# Altium footprint library WR-TBL_Pluggable Connector_5.08mm.PcbLib: 295 footprints (part 4 of 19)
Each footprint in its own frame and in the unit in brackets; x right, y up, seen from the top. Pads: shape width x height; smd on the part's side, far side on the other; paste and mask are expansions set on the pad; w line width, h text height; cw(c..) or ccw(c..) is an arc to the next point about the centre after c.
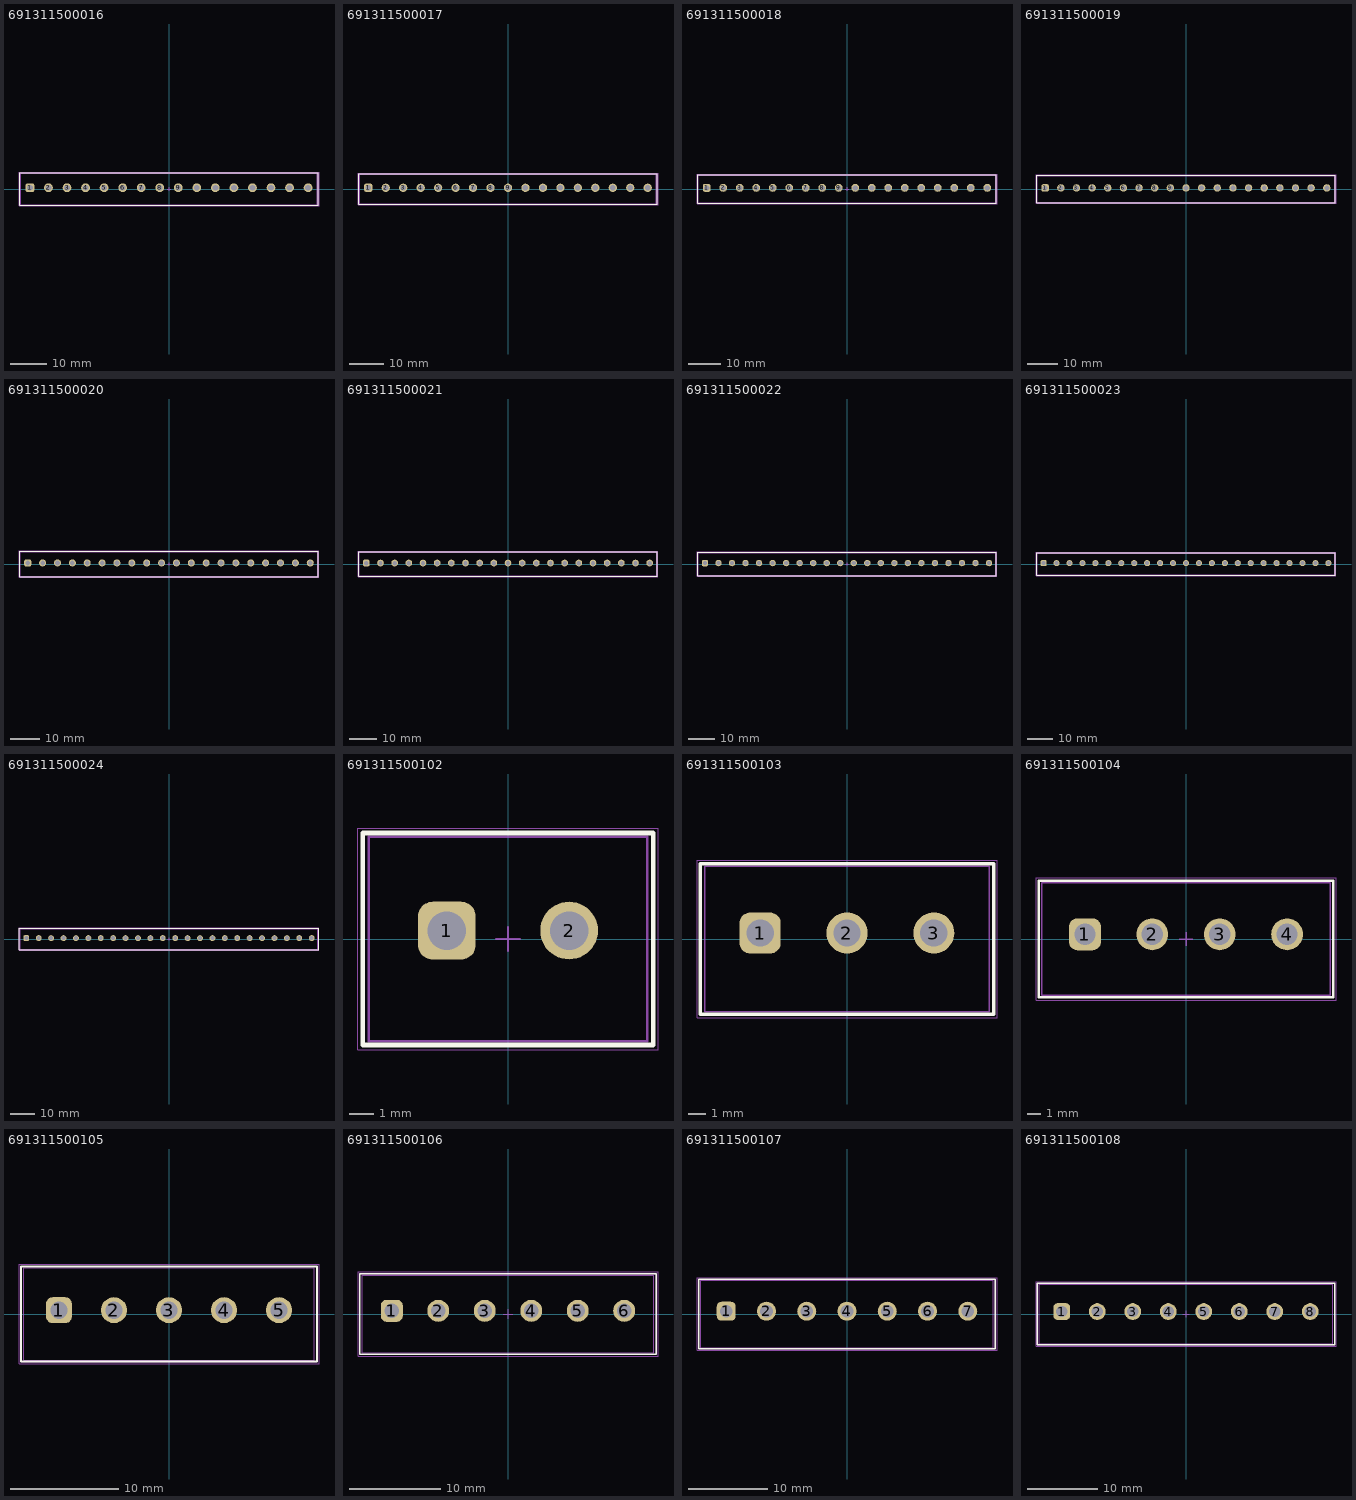
[diagram p3: the footprints below, top view; thin cyan lines are the x and y axes]

## 691311500016 [mm] "5,08mm - PCB Headers - Vertical - Opened ends -16p"
height 12
pads (16):
  rrect50% 2.4x2.4 hole 1.6: 1(-38.1,0.35)
  round 2.4 hole 1.6: 2(-33.02,0.35) 3(-27.94,0.35) 4(-22.86,0.35) 5(-17.78,0.35) 6(-12.7,0.35) 7(-7.62,0.35) 8(-2.54,0.35) 9(2.54,0.35) 10(7.62,0.35) 11(12.7,0.35) 12(17.78,0.35) 13(22.86,0.35) 14(27.94,0.35) 15(33.02,0.35) 16(38.1,0.35)
Top Overlay:
  lines w0.2: -40.89,-4.4 40.89,-4.4 40.89,4.4 -40.89,4.4 -40.89,-4.4
Top Assembly:
  lines w0.1: -40.89,-4.4 -40.89,4.4 40.89,4.4 40.89,-4.4 -40.89,-4.4
Top Designator:
  text ".Designator" at -3.647,-0.357 h1
Top 3D Body:
  lines w0.1: -40.64,-4.25 40.64,-4.25 40.64,4.25 -40.64,4.25 -40.64,-4.25
Top Courtyard:
  lines w0.05: -41.09,-4.6 41.09,-4.6 41.09,4.6 -41.09,4.6 -41.09,-4.6
Top Component Center:
  lines w0.1: -0.5,0 0.5,0 ; 0,-0.5 0,0.5
3D body "691311500016.stp": height 12.05, standoff -3.95, extent -40.64,-4.25 40.64,4.25

## 691311500017 [mm] "5,08mm - PCB Headers - Vertical - Opened ends -17p"
height 12
pads (17):
  rrect50% 2.4x2.4 hole 1.6: 1(-40.64,0.35)
  round 2.4 hole 1.6: 2(-35.56,0.35) 3(-30.48,0.35) 4(-25.4,0.35) 5(-20.32,0.35) 6(-15.24,0.35) 7(-10.16,0.35) 8(-5.08,0.35) 9(0,0.35) 10(5.08,0.35) 11(10.16,0.35) 12(15.24,0.35) 13(20.32,0.35) 14(25.4,0.35) 15(30.48,0.35) 16(35.56,0.35) 17(40.64,0.35)
Top Overlay:
  lines w0.2: -43.43,-4.4 43.43,-4.4 43.43,4.4 -43.43,4.4 -43.43,-4.4
Top Assembly:
  lines w0.1: -43.43,-4.4 -43.43,4.4 43.43,4.4 43.43,-4.4 -43.43,-4.4
Top Designator:
  text ".Designator" at -3.647,-0.357 h1
Top 3D Body:
  lines w0.1: -43.18,-4.25 43.18,-4.25 43.18,4.25 -43.18,4.25 -43.18,-4.25
Top Courtyard:
  lines w0.05: -43.63,-4.6 43.63,-4.6 43.63,4.6 -43.63,4.6 -43.63,-4.6
Top Component Center:
  lines w0.1: -0.5,0 0.5,0 ; 0,-0.5 0,0.5
3D body "691311500017.stp": height 12.05, standoff -3.95, extent -43.18,-4.25 43.18,4.25

## 691311500018 [mm] "5,08mm - PCB Headers - Vertical - Opened ends -18p"
height 12
pads (18):
  rrect50% 2.4x2.4 hole 1.6: 1(-43.18,0.35)
  round 2.4 hole 1.6: 2(-38.1,0.35) 3(-33.02,0.35) 4(-27.94,0.35) 5(-22.86,0.35) 6(-17.78,0.35) 7(-12.7,0.35) 8(-7.62,0.35) 9(-2.54,0.35) 10(2.54,0.35) 11(7.62,0.35) 12(12.7,0.35) 13(17.78,0.35) 14(22.86,0.35) 15(27.94,0.35) 16(33.02,0.35) 17(38.1,0.35) 18(43.18,0.35)
Top Overlay:
  lines w0.2: -45.97,-4.4 45.97,-4.4 45.97,4.4 -45.97,4.4 -45.97,-4.4
Top Assembly:
  lines w0.1: -45.97,-4.4 -45.97,4.4 45.97,4.4 45.97,-4.4 -45.97,-4.4
Top Designator:
  text ".Designator" at -3.647,-0.357 h1
Top 3D Body:
  lines w0.1: -45.72,-4.25 45.72,-4.25 45.72,4.25 -45.72,4.25 -45.72,-4.25
Top Courtyard:
  lines w0.05: -46.17,-4.6 46.17,-4.6 46.17,4.6 -46.17,4.6 -46.17,-4.6
Top Component Center:
  lines w0.1: -0.5,0 0.5,0 ; 0,-0.5 0,0.5
3D body "691311500018.stp": height 12.05, standoff -3.95, extent -45.72,-4.25 45.72,4.25

## 691311500019 [mm] "5,08mm - PCB Headers - Vertical - Opened ends -19p"
height 12
pads (19):
  rrect50% 2.4x2.4 hole 1.6: 1(-45.72,0.35)
  round 2.4 hole 1.6: 2(-40.64,0.35) 3(-35.56,0.35) 4(-30.48,0.35) 5(-25.4,0.35) 6(-20.32,0.35) 7(-15.24,0.35) 8(-10.16,0.35) 9(-5.08,0.35) 10(0,0.35) 11(5.08,0.35) 12(10.16,0.35) 13(15.24,0.35) 14(20.32,0.35) 15(25.4,0.35) 16(30.48,0.35) 17(35.56,0.35) 18(40.64,0.35) 19(45.72,0.35)
Top Overlay:
  lines w0.2: -48.51,-4.4 48.51,-4.4 48.51,4.4 -48.51,4.4 -48.51,-4.4
Top Assembly:
  lines w0.1: -48.51,-4.4 -48.51,4.4 48.51,4.4 48.51,-4.4 -48.51,-4.4
Top Designator:
  text ".Designator" at -3.647,-0.357 h1
Top 3D Body:
  lines w0.1: -48.26,-4.25 48.26,-4.25 48.26,4.25 -48.26,4.25 -48.26,-4.25
Top Courtyard:
  lines w0.05: -48.71,-4.6 48.71,-4.6 48.71,4.6 -48.71,4.6 -48.71,-4.6
Top Component Center:
  lines w0.1: -0.5,0 0.5,0 ; 0,-0.5 0,0.5
3D body "691311500019.stp": height 12.05, standoff -3.95, extent -48.26,-4.25 48.26,4.25

## 691311500020 [mm] "5,08mm - PCB Headers - Vertical - Opened ends -20p"
height 12
pads (20):
  rrect50% 2.4x2.4 hole 1.6: 1(-48.26,0.35)
  round 2.4 hole 1.6: 2(-43.18,0.35) 3(-38.1,0.35) 4(-33.02,0.35) 5(-27.94,0.35) 6(-22.86,0.35) 7(-17.78,0.35) 8(-12.7,0.35) 9(-7.62,0.35) 10(-2.54,0.35) 11(2.54,0.35) 12(7.62,0.35) 13(12.7,0.35) 14(17.78,0.35) 15(22.86,0.35) 16(27.94,0.35) 17(33.02,0.35) 18(38.1,0.35) 19(43.18,0.35) 20(48.26,0.35)
Top Overlay:
  lines w0.2: -51.05,-4.4 51.05,-4.4 51.05,4.4 -51.05,4.4 -51.05,-4.4
Top Assembly:
  lines w0.1: -51.05,-4.4 -51.05,4.4 51.05,4.4 51.05,-4.4 -51.05,-4.4
Top Designator:
  text ".Designator" at -3.647,-0.357 h1
Top 3D Body:
  lines w0.1: -50.8,-4.25 50.8,-4.25 50.8,4.25 -50.8,4.25 -50.8,-4.25
Top Courtyard:
  lines w0.05: -51.25,-4.6 51.25,-4.6 51.25,4.6 -51.25,4.6 -51.25,-4.6
Top Component Center:
  lines w0.1: -0.5,0 0.5,0 ; 0,-0.5 0,0.5
3D body "691311500020.stp": height 12.05, standoff -3.95, extent -50.8,-4.25 50.8,4.25

## 691311500021 [mm] "5,08mm - PCB Headers - Vertical - Opened ends -21p"
height 12
pads (21):
  rrect50% 2.4x2.4 hole 1.6: 1(-50.8,0.35)
  round 2.4 hole 1.6: 2(-45.72,0.35) 3(-40.64,0.35) 4(-35.56,0.35) 5(-30.48,0.35) 6(-25.4,0.35) 7(-20.32,0.35) 8(-15.24,0.35) 9(-10.16,0.35) 10(-5.08,0.35) 11(0,0.35) 12(5.08,0.35) 13(10.16,0.35) 14(15.24,0.35) 15(20.32,0.35) 16(25.4,0.35) 17(30.48,0.35) 18(35.56,0.35) 19(40.64,0.35) 20(45.72,0.35) 21(50.8,0.35)
Top Overlay:
  lines w0.2: -53.59,-4.4 53.59,-4.4 53.59,4.4 -53.59,4.4 -53.59,-4.4
Top Assembly:
  lines w0.1: -53.59,-4.4 -53.59,4.4 53.59,4.4 53.59,-4.4 -53.59,-4.4
Top Designator:
  text ".Designator" at -3.647,-0.357 h1
Top 3D Body:
  lines w0.1: -53.34,-4.25 53.34,-4.25 53.34,4.25 -53.34,4.25 -53.34,-4.25
Top Courtyard:
  lines w0.05: -53.79,-4.6 53.79,-4.6 53.79,4.6 -53.79,4.6 -53.79,-4.6
Top Component Center:
  lines w0.1: -0.5,0 0.5,0 ; 0,-0.5 0,0.5
3D body "691311500021.stp": height 12.05, standoff -3.95, extent -53.34,-4.25 53.34,4.25

## 691311500022 [mm] "5,08mm - PCB Headers - Vertical - Opened ends -22p"
height 12
pads (22):
  rrect50% 2.4x2.4 hole 1.6: 1(-53.34,0.35)
  round 2.4 hole 1.6: 2(-48.26,0.35) 3(-43.18,0.35) 4(-38.1,0.35) 5(-33.02,0.35) 6(-27.94,0.35) 7(-22.86,0.35) 8(-17.78,0.35) 9(-12.7,0.35) 10(-7.62,0.35) 11(-2.54,0.35) 12(2.54,0.35) 13(7.62,0.35) 14(12.7,0.35) 15(17.78,0.35) 16(22.86,0.35) 17(27.94,0.35) 18(33.02,0.35) 19(38.1,0.35) 20(43.18,0.35) 21(48.26,0.35) 22(53.34,0.35)
Top Overlay:
  lines w0.2: -56.13,-4.4 56.13,-4.4 56.13,4.4 -56.13,4.4 -56.13,-4.4
Top Assembly:
  lines w0.1: -56.13,-4.4 -56.13,4.4 56.13,4.4 56.13,-4.4 -56.13,-4.4
Top Designator:
  text ".Designator" at -3.647,-0.357 h1
Top 3D Body:
  lines w0.1: -55.88,-4.25 55.88,-4.25 55.88,4.25 -55.88,4.25 -55.88,-4.25
Top Courtyard:
  lines w0.05: -56.33,-4.6 56.33,-4.6 56.33,4.6 -56.33,4.6 -56.33,-4.6
Top Component Center:
  lines w0.1: -0.5,0 0.5,0 ; 0,-0.5 0,0.5
3D body "691311500022.stp": height 12.05, standoff -3.95, extent -55.88,-4.25 55.88,4.25

## 691311500023 [mm] "5,08mm - PCB Headers - Vertical - Opened ends -23p"
height 12
pads (23):
  rrect50% 2.4x2.4 hole 1.6: 1(-55.88,0.35)
  round 2.4 hole 1.6: 2(-50.8,0.35) 3(-45.72,0.35) 4(-40.64,0.35) 5(-35.56,0.35) 6(-30.48,0.35) 7(-25.4,0.35) 8(-20.32,0.35) 9(-15.24,0.35) 10(-10.16,0.35) 11(-5.08,0.35) 12(0,0.35) 13(5.08,0.35) 14(10.16,0.35) 15(15.24,0.35) 16(20.32,0.35) 17(25.4,0.35) 18(30.48,0.35) 19(35.56,0.35) 20(40.64,0.35) 21(45.72,0.35) 22(50.8,0.35) 23(55.88,0.35)
Top Overlay:
  lines w0.2: -58.67,-4.4 58.67,-4.4 58.67,4.4 -58.67,4.4 -58.67,-4.4
Top Assembly:
  lines w0.1: -58.67,-4.4 -58.67,4.4 58.67,4.4 58.67,-4.4 -58.67,-4.4
Top Designator:
  text ".Designator" at -3.647,-0.357 h1
Top 3D Body:
  lines w0.1: -58.42,-4.25 58.42,-4.25 58.42,4.25 -58.42,4.25 -58.42,-4.25
Top Courtyard:
  lines w0.05: -58.87,-4.6 58.87,-4.6 58.87,4.6 -58.87,4.6 -58.87,-4.6
Top Component Center:
  lines w0.1: -0.5,0 0.5,0 ; 0,-0.5 0,0.5
3D body "691311500023.stp": height 12.05, standoff -3.95, extent -58.42,-4.25 58.42,4.25

## 691311500024 [mm] "5,08mm - PCB Headers - Vertical - Opened ends -24p"
height 12
pads (24):
  rrect50% 2.4x2.4 hole 1.6: 1(-58.42,0.35)
  round 2.4 hole 1.6: 2(-53.34,0.35) 3(-48.26,0.35) 4(-43.18,0.35) 5(-38.1,0.35) 6(-33.02,0.35) 7(-27.94,0.35) 8(-22.86,0.35) 9(-17.78,0.35) 10(-12.7,0.35) 11(-7.62,0.35) 12(-2.54,0.35) 13(2.54,0.35) 14(7.62,0.35) 15(12.7,0.35) 16(17.78,0.35) 17(22.86,0.35) 18(27.94,0.35) 19(33.02,0.35) 20(38.1,0.35) 21(43.18,0.35) 22(48.26,0.35) 23(53.34,0.35) 24(58.42,0.35)
Top Overlay:
  lines w0.2: -61.21,-4.4 61.21,-4.4 61.21,4.4 -61.21,4.4 -61.21,-4.4
Top Assembly:
  lines w0.1: -61.21,-4.4 -61.21,4.4 61.21,4.4 61.21,-4.4 -61.21,-4.4
Top Designator:
  text ".Designator" at -3.647,-0.357 h1
Top 3D Body:
  lines w0.1: -60.96,-4.25 60.96,-4.25 60.96,4.25 -60.96,4.25 -60.96,-4.25
Top Courtyard:
  lines w0.05: -61.41,-4.6 61.41,-4.6 61.41,4.6 -61.41,4.6 -61.41,-4.6
Top Component Center:
  lines w0.1: -0.5,0 0.5,0 ; 0,-0.5 0,0.5
3D body "691311500024.stp": height 12.05, standoff -3.95, extent -60.96,-4.25 60.96,4.25

## 691311500102 [mm] "5,08mm - PCB Headers - Vertical - Closed ends -02p"
height 12
pads (2):
  rrect50% 2.4x2.4 hole 1.6: 1(-2.54,0.35)
  round 2.4 hole 1.6: 2(2.54,0.35)
Top Overlay:
  lines w0.2: -6.03,-4.4 6.03,-4.4 6.03,4.4 -6.03,4.4 -6.03,-4.4
Top Assembly:
  lines w0.1: -6.03,-4.4 -6.03,4.4 6.03,4.4 6.03,-4.4 -6.03,-4.4
Top Designator:
  text ".Designator" at -3.647,-0.357 h1
Top 3D Body:
  lines w0.1: -5.78,-4.25 5.78,-4.25 5.78,4.25 -5.78,4.25 -5.78,-4.25
Top Courtyard:
  lines w0.05: -6.23,-4.6 6.23,-4.6 6.23,4.6 -6.23,4.6 -6.23,-4.6
Top Component Center:
  lines w0.1: -0.5,0 0.5,0 ; 0,-0.5 0,0.5
3D body "691311500102.stp": height 12.05, standoff -3.95, extent -5.78,-4.25 5.78,4.25

## 691311500103 [mm] "5,08mm - PCB Headers - Vertical - Closed ends -03p"
height 12
pads (3):
  rrect50% 2.4x2.4 hole 1.6: 1(-5.08,0.35)
  round 2.4 hole 1.6: 2(0,0.35) 3(5.08,0.35)
Top Overlay:
  lines w0.2: -8.57,-4.4 8.57,-4.4 8.57,4.4 -8.57,4.4 -8.57,-4.4
Top Assembly:
  lines w0.1: -8.57,-4.4 -8.57,4.4 8.57,4.4 8.57,-4.4 -8.57,-4.4
Top Designator:
  text ".Designator" at -3.647,-0.357 h1
Top 3D Body:
  lines w0.1: -8.32,-4.25 8.32,-4.25 8.32,4.25 -8.32,4.25 -8.32,-4.25
Top Courtyard:
  lines w0.05: -8.77,-4.6 8.77,-4.6 8.77,4.6 -8.77,4.6 -8.77,-4.6
Top Component Center:
  lines w0.1: -0.5,0 0.5,0 ; 0,-0.5 0,0.5
3D body "691311500103.stp": height 12.05, standoff -3.95, extent -8.32,-4.25 8.32,4.25

## 691311500104 [mm] "5,08mm - PCB Headers - Vertical - Closed ends -04p"
height 12
pads (4):
  rrect50% 2.4x2.4 hole 1.6: 1(-7.62,0.35)
  round 2.4 hole 1.6: 2(-2.54,0.35) 3(2.54,0.35) 4(7.62,0.35)
Top Overlay:
  lines w0.2: -11.11,-4.4 11.11,-4.4 11.11,4.4 -11.11,4.4 -11.11,-4.4
Top Assembly:
  lines w0.1: -11.11,-4.4 -11.11,4.4 11.11,4.4 11.11,-4.4 -11.11,-4.4
Top Designator:
  text ".Designator" at -3.647,-0.357 h1
Top 3D Body:
  lines w0.1: -10.86,-4.25 10.86,-4.25 10.86,4.25 -10.86,4.25 -10.86,-4.25
Top Courtyard:
  lines w0.05: -11.31,-4.6 11.31,-4.6 11.31,4.6 -11.31,4.6 -11.31,-4.6
Top Component Center:
  lines w0.1: -0.5,0 0.5,0 ; 0,-0.5 0,0.5
3D body "691311500104.stp": height 12.05, standoff -3.95, extent -10.86,-4.25 10.86,4.25

## 691311500105 [mm] "5,08mm - PCB Headers - Vertical - Closed ends -05p"
height 12
pads (5):
  rrect50% 2.4x2.4 hole 1.6: 1(-10.16,0.35)
  round 2.4 hole 1.6: 2(-5.08,0.35) 3(0,0.35) 4(5.08,0.35) 5(10.16,0.35)
Top Overlay:
  lines w0.2: -13.65,-4.4 13.65,-4.4 13.65,4.4 -13.65,4.4 -13.65,-4.4
Top Assembly:
  lines w0.1: -13.65,-4.4 -13.65,4.4 13.65,4.4 13.65,-4.4 -13.65,-4.4
Top Designator:
  text ".Designator" at -3.647,-0.357 h1
Top 3D Body:
  lines w0.1: -13.4,-4.25 13.4,-4.25 13.4,4.25 -13.4,4.25 -13.4,-4.25
Top Courtyard:
  lines w0.05: -13.85,-4.6 13.85,-4.6 13.85,4.6 -13.85,4.6 -13.85,-4.6
Top Component Center:
  lines w0.1: -0.5,0 0.5,0 ; 0,-0.5 0,0.5
3D body "691311500105.stp": height 12.05, standoff -3.95, extent -13.4,-4.25 13.4,4.25

## 691311500106 [mm] "5,08mm - PCB Headers - Vertical - Closed ends -06p"
height 12
pads (6):
  rrect50% 2.4x2.4 hole 1.6: 1(-12.7,0.35)
  round 2.4 hole 1.6: 2(-7.62,0.35) 3(-2.54,0.35) 4(2.54,0.35) 5(7.62,0.35) 6(12.7,0.35)
Top Overlay:
  lines w0.2: -16.19,-4.4 16.19,-4.4 16.19,4.4 -16.19,4.4 -16.19,-4.4
Top Assembly:
  lines w0.1: -16.19,-4.4 -16.19,4.4 16.19,4.4 16.19,-4.4 -16.19,-4.4
Top Designator:
  text ".Designator" at -3.647,-0.357 h1
Top 3D Body:
  lines w0.1: -15.94,-4.25 15.94,-4.25 15.94,4.25 -15.94,4.25 -15.94,-4.25
Top Courtyard:
  lines w0.05: -16.39,-4.6 16.39,-4.6 16.39,4.6 -16.39,4.6 -16.39,-4.6
Top Component Center:
  lines w0.1: -0.5,0 0.5,0 ; 0,-0.5 0,0.5
3D body "691311500106.stp": height 12.05, standoff -3.95, extent -15.94,-4.25 15.94,4.25

## 691311500107 [mm] "5,08mm - PCB Headers - Vertical - Closed ends -07p"
height 12
pads (7):
  rrect50% 2.4x2.4 hole 1.6: 1(-15.24,0.35)
  round 2.4 hole 1.6: 2(-10.16,0.35) 3(-5.08,0.35) 4(0,0.35) 5(5.08,0.35) 6(10.16,0.35) 7(15.24,0.35)
Top Overlay:
  lines w0.2: -18.73,-4.4 18.73,-4.4 18.73,4.4 -18.73,4.4 -18.73,-4.4
Top Assembly:
  lines w0.1: -18.73,-4.4 -18.73,4.4 18.73,4.4 18.73,-4.4 -18.73,-4.4
Top Designator:
  text ".Designator" at -3.647,-0.357 h1
Top 3D Body:
  lines w0.1: -18.48,-4.25 18.48,-4.25 18.48,4.25 -18.48,4.25 -18.48,-4.25
Top Courtyard:
  lines w0.05: -18.93,-4.6 18.93,-4.6 18.93,4.6 -18.93,4.6 -18.93,-4.6
Top Component Center:
  lines w0.1: -0.5,0 0.5,0 ; 0,-0.5 0,0.5
3D body "691311500107.stp": height 12.05, standoff -3.95, extent -18.48,-4.25 18.48,4.25

## 691311500108 [mm] "5,08mm - PCB Headers - Vertical - Closed ends -08p"
height 12
pads (8):
  rrect50% 2.4x2.4 hole 1.6: 1(-17.78,0.35)
  round 2.4 hole 1.6: 2(-12.7,0.35) 3(-7.62,0.35) 4(-2.54,0.35) 5(2.54,0.35) 6(7.62,0.35) 7(12.7,0.35) 8(17.78,0.35)
Top Overlay:
  lines w0.2: -21.27,-4.4 21.27,-4.4 21.27,4.4 -21.27,4.4 -21.27,-4.4
Top Assembly:
  lines w0.1: -21.27,-4.4 -21.27,4.4 21.27,4.4 21.27,-4.4 -21.27,-4.4
Top Designator:
  text ".Designator" at -3.647,-0.357 h1
Top 3D Body:
  lines w0.1: -21.02,-4.25 21.02,-4.25 21.02,4.25 -21.02,4.25 -21.02,-4.25
Top Courtyard:
  lines w0.05: -21.47,-4.6 21.47,-4.6 21.47,4.6 -21.47,4.6 -21.47,-4.6
Top Component Center:
  lines w0.1: -0.5,0 0.5,0 ; 0,-0.5 0,0.5
3D body "691311500108.stp": height 12.05, standoff -3.95, extent -21.02,-4.25 21.02,4.25